# Altium schematic symbol library RMCF0805JT33R0.SchLib: 1 symbol
Pins are listed as number, name and electrical type; pins without a type are passive.

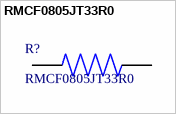
[diagram p0: symbol RMCF0805JT33R0]

## RMCF0805JT33R0
designator R?
RES 33 OHM 5% 1/8W 0805; Manufacturer_Name: Stackpole International; Copyright: Copyright (C) 2026 Ultra Librarian. All rights reserved.; Manufacturer_Part_Number: RMCF0805JT33R0
footprint STA_RMCF0805_STP
pins: 1, 2